# Altium integrated library control_board_v2.IntLib: 31 symbols
Pins are listed as number, name and electrical type; pins without a type are passive.

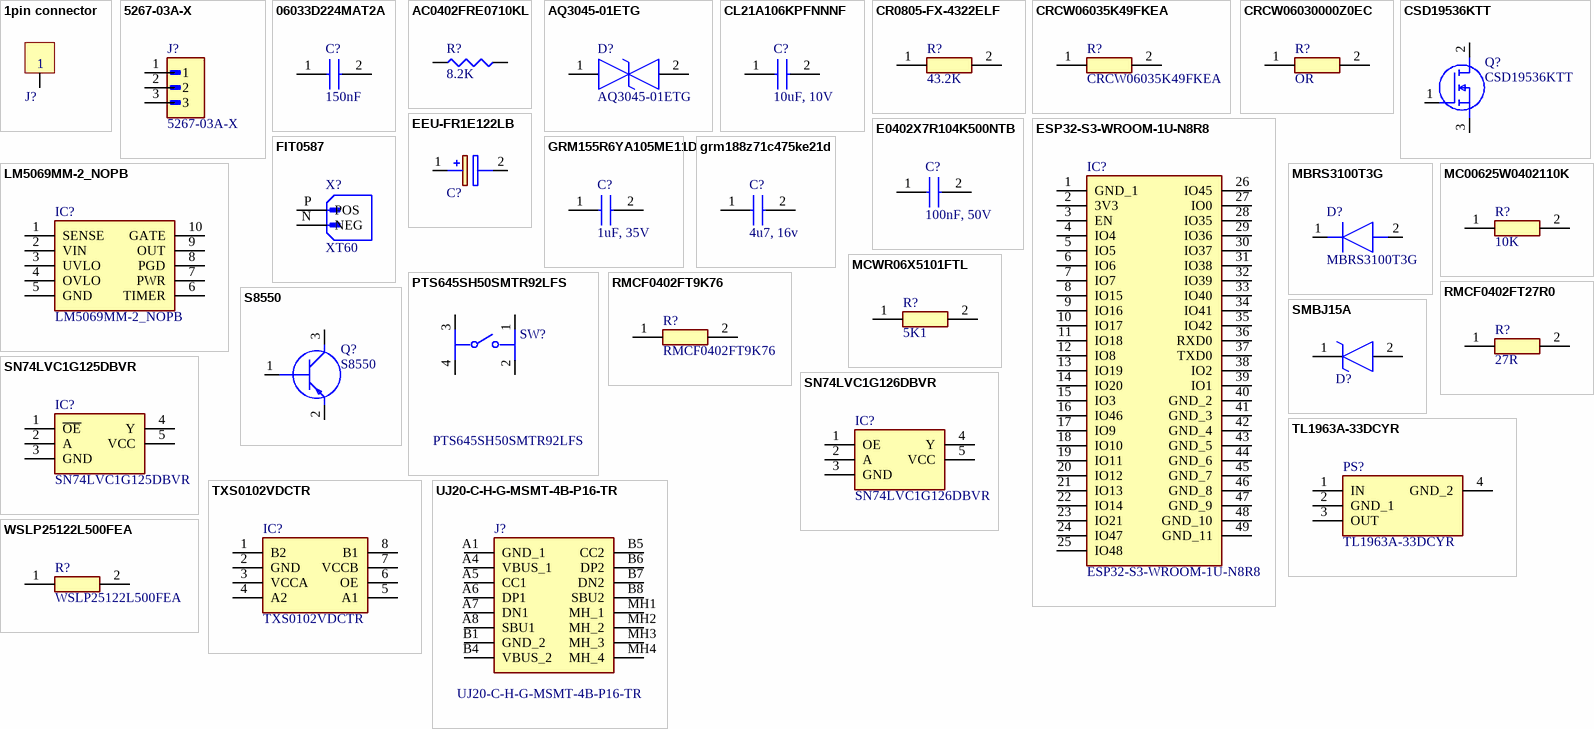
[diagram p0: symbols 1pin connector to WSLP25122L500FEA]

## 1pin connector
designator J?  (value not drawn)
Board Connector, 1 Contact(s), 1 Row(s), Female, Straight, Solder Terminal, Black Insulator, Receptacle; GPIO_Net: *
footprint 1 pin_conn
pins: 1

## 5267-03A-X
designator J?
CONN HEADER TH 3POS 2.5mm; MF: Molex; SnapEDA_Link: https://www.snapeda.com/parts/5267-03A-X/Molex/view-part/?ref=snap; Package: None; Value: *; MP: 5267-03A-X; Check_prices: https://www.snapeda.com/parts/5267-03A-X/Molex/view-part/?ref=eda
footprint MOLEX_5267-03A-X
footprint MOLEX_5267-03A-X
pins: 1, 2, 3

## 06033D224MAT2A
designator C?, comment 150nF
Multilayer Ceramic Capacitors MLCC - SMD/SMT KGM15BR51E224MT NEW GLOBAL PN 25V .22uF A 581-; Manufacturer_Name: Kyocera AVX; Manufacturer_Part_Number: 06033D224MAT2A; Datasheet Link: https://componentsearchengine.com/Datasheets/1/06031A100FAT2A.pdf; Height: 0.9mm; Mouser Part Number: 581-06033D224MAT2A; Mouser Price/Stock: https://www.mouser.co.uk/ProductDetail/KYOCERA-AVX/06033D224MAT2A?qs=VsusWq3clnxkz0k6zqAqqQ%3D%3D
footprint CAPC1608X90N
pins: 1, 2

## AC0402FRE0710KL
designator R?, comment 8.2K
Thin Film Resistors - SMD MCT 0603-50 1% P5 10K2; Manufacturer: Yageo Group; Manufacturer Part Number: AC0402FRE0710KL; Power Dissipation: 62.5mW; Value: 10kΩ; Temperature Coefficient: 50ppm/°C; Working Voltage: 50V; Supplier: DigiKey; Supplier Part Number: 13-AC0402FRE0710KLCT-ND; RoHS: Compliant; Category: Chip SMD Resistors; Stock: 4000; Pricing: 1=0.1, 10=0.037, 25=0.0276, 50=0.0226, 100=0.0186, 250=0.01476, 500=0.01256, 1000=0.01081, 5000=0.00806 (USD); Case/Package: 0402; China RoHS: Non-Compliant; Height: 320µm; Lifecycle Status: Production; Max Operating Temperature: 155°C; Min Operating Temperature: -55°C; Mounting Technology: Surface Mount; Number of Terminals: 2; Packaging: Tape & Reel; REACH SVHC: Yes; Tolerance: 1%; Width: 500µm; ComponentLink1URL: https://datasheet.octopart.com:443/AC0402FRE0710KL-Yageo-datasheet-182189378.pdf?src-supplier=IHS; ComponentLink1Description: https://datasheet.octopart.com:443/AC0402FRE0710KL-Yageo-datasheet-182189378.pdf?src-supplier=IHS; ComponentLink2URL: https://datasheet.octopart.com/AC0402FRE0710KL-Yageo-datasheet-12512238.pdf; ComponentLink2Description: https://datasheet.octopart.com/AC0402FRE0710KL-Yageo-datasheet-12512238.pdf; ComponentLink3URL: http://sigma.octopart.com:80/rohs_statement/Yageo-company-2.pdf?src-supplier=Compliance+Statements; ComponentLink3Description: http://sigma.octopart.com:80/rohs_statement/Yageo-company-2.pdf?src-supplier=Compliance+Statements; ComponentLink4URL: http://sigma.octopart.com:80/conflict_mineral_statement/Yageo-company-3.pdf?src-supplier=Compliance+Statements; ComponentLink4Description: http://sigma.octopart.com:80/conflict_mineral_statement/Yageo-company-3.pdf?src-supplier=Compliance+Statements; LCSC Part Number: C7209924
footprint RESC1005X37N
pins: 1, 2

## AQ3045-01ETG
designator D?
TVS Diode (Bi-directional); Manufacturer_Name: LITTELFUSE; Datasheet Link: http://m.littelfuse.com/~/media/electronics/datasheets/tvs_diode_arrays/littelfuse_tvs_diode_array_aq3045_datasheet.pdf.pdf; Height: 0.42mm; Manufacturer_Part_Number: AQ3045-01ETG; Mouser Part Number: 576-AQ3045-01ETG; Mouser Price/Stock: https://www.mouser.co.uk/ProductDetail/Littelfuse/AQ3045-01ETG?qs=lM4gFlnEeEMEfe%252B5jSw4OA%3D%3D; Arrow Part Number: AQ3045-01ETG; Arrow Price/Stock: https://www.arrow.com/en/products/aq3045-01etg/littelfuse.html?utm_currency=USD&region=nac
footprint AQ304501ETG
pins: 1, 2

## CL21A106KPFNNNF
designator C?, comment 10uF, 10V
Cap Ceramic 10uF 10V X5R 10% SMD 0805 85C Embossed T/R; Manufacturer_Name: Yageo Group; Manufacturer_Part_Number: C0402C101G3GALTU; Height: 0.55mm; Datasheet Link: https://content.kemet.com/datasheets/KEM_C1002_X7R_SMD.pdf
footprint C0402C104J4RACTU
pins: 1, 2

## CR0805-FX-4322ELF
designator R?, comment 43.2K
Res Thick Film 0805 43.2K Ohm 1% 1/8W 100ppm/C Molded SMD SMD Paper Tape on Plastic Reel; Manufacturer_Name: Bourns; Manufacturer_Part_Number: CR0805-FX-4322ELF; Height: 0.6mm; Datasheet Link: https://www.bourns.com/pdfs/chpreztr.pdf; Mouser Part Number: 652-CR0805FX-4322ELF; Mouser Price/Stock: https://www.mouser.co.uk/ProductDetail/Bourns/CR0805-FX-4322ELF?qs=TYKCbaKwe1AoFj9Z1kLM%2Fw%3D%3D
footprint RESC2012X60N
pins: 1, 2

## CRCW06035K49FKEA
designator R?
Res Thick Film 0603 5.49K Ohm 1% 0.1W(1/10W) 100ppm/C Pad SMD T/R Automotive AEC-Q200; Manufacturer_Name: Vishay; Height: 0.5mm; Datasheet Link: http://www.vishay.com/docs/20035/dcrcwe3.pdf; Manufacturer_Part_Number: CRCW06035K49FKEA; Mouser Part Number: 71-CRCW0603-5.49K-E3; Mouser Price/Stock: https://www.mouser.co.uk/ProductDetail/Vishay-Dale/CRCW06035K49FKEA?qs=C0yavoHm3BmrHuoVQmHL9Q%3D%3D
footprint RESC1608X50N
pins: 1, 2

## CRCW06030000Z0EC
designator R?, comment OR
Resistor; Manufacturer_Name: Vishay; Manufacturer_Part_Number: CRCW06030000Z0EC; Height: 0.5mm; Datasheet Link: http://www.vishay.com/docs/20035/dcrcwe3.pdf; Mouser Part Number: 71-CRCW06030000Z0EC; Mouser Price/Stock: https://www.mouser.co.uk/ProductDetail/Vishay-Dale/CRCW06030000Z0EC?qs=5Vo7YKalRVV5nT3RQodYAA%3D%3D; Arrow Part Number: CRCW06030000Z0EC; Arrow Price/Stock: https://www.arrow.com/en/products/crcw06030000z0ec/vishay?utm_currency=USD&region=nac
footprint RESC1608X50N
footprint RESC1608X50N
pins: 1, 2

## CSD19536KTT
designator Q?
MOSFET (N-Channel); Manufacturer_Name: Texas Instruments; Datasheet Link: http://www.ti.com/lit/gpn/csd19536ktt; Manufacturer_Part_Number: CSD19536KTT; Mouser Part Number: 595-CSD19536KTT; Mouser Price/Stock: https://www.mouser.co.uk/ProductDetail/Texas-Instruments/CSD19536KTT?qs=MiqG6Kq1qKP2NIsb3jZrDg%3D%3D; Arrow Part Number: CSD19536KTT; Arrow Price/Stock: https://www.arrow.com/en/products/csd19536ktt/texas-instruments.html?utm_currency=USD&region=nac
footprint CSD19536KTTT
footprint CSD19536KTTT
pins: 1 G, 2 D, 3 S

## E0402X7R104K500NTB
designator C?, comment 100nF, 50V
100 nF 10% 50V Ceramic Capacitor X7R 0402 (1005 Metric); Manufacturer_Name: Yageo Group; Manufacturer_Part_Number: C0402C101G3GALTU; Datasheet Link: https://content.kemet.com/datasheets/KEM_C1002_X7R_SMD.pdf; Height: 0.55mm
footprint C0402C104J4RACTU
footprint C0402C104J4RACTU
pins: 1, 2

## EEU-FR1E122LB
designator C?  (value not drawn)
Capacitor Polarised; Manufacturer_Name: Panasonic; Datasheet Link: http://industrial.panasonic.com/cdbs/www-data/pdf/RDF0000/ABA0000C1259.pdf; Height: 27mm; Manufacturer_Part_Number: EEU-FR1E122LB; Mouser Part Number: 667-EEU-FR1E122LB; Mouser Price/Stock: https://www.mouser.com/Search/Refine.aspx?Keyword=667-EEU-FR1E122LB
footprint CAPPRD500W65D1000H2700
pins: 1 +, 2 -

## ESP32-S3-WROOM-1U-N8R8
designator IC?
Integrated Circuit; Manufacturer_Name: Espressif Systems; Datasheet Link: https://www.espressif.com/sites/default/files/documentation/esp32-s3-wroom-1_wroom-1u_datasheet_en.pdf; Height: 3.35mm; Manufacturer_Part_Number: ESP32-S3-WROOM-1U-N8R8; Mouser Part Number: 356-ESP32S3WRM1UN8R8; Mouser Price/Stock: https://www.mouser.co.uk/ProductDetail/Espressif-Systems/ESP32-S3-WROOM-1U-N8R8?qs=Li%252BoUPsLEnvOglIa3CypaQ%3D%3D
footprint ESP32S3WROOM1UN8R8
footprint ESP32S3WROOM1UN8R8
pins: 1 GND_1, 2 3V3, 3 EN, 4 IO4, 5 IO5, 6 IO6, 7 IO7, 8 IO15, 9 IO16, 10 IO17, 11 IO18, 12 IO8, 13 IO19, 14 IO20, 15 IO3, 16 IO46, 17 IO9, 18 IO10, 19 IO11, 20 IO12, 21 IO13, 22 IO14, 23 IO21, 24 IO47, 25 IO48, 26 IO45, 27 IO0, 28 IO35, 29 IO36, 30 IO37, 31 IO38, 32 IO39, 33 IO40, 34 IO41, 35 IO42, 36 RXD0, 37 TXD0, 38 IO2, 39 IO1, 40 GND_2, 41 GND_3, 42 GND_4, 43 GND_5, 44 GND_6, 45 GND_7, 46 GND_8, 47 GND_9, 48 GND_10, 49 GND_11

## FIT0587
designator X?, comment XT60
High Quality Gold Plated XT60 Male and amp, Female Bullet Connector; Manufacturer: DFRobot; Manufacturer Part Number: FIT0587; Supplier: DigiKey; Supplier Part Number: 1738-1437-ND; Category: Uncategorized; Stock: 5338; Pricing: 1=1.5 (USD); RoHS: Non-Compliant
footprint AMASS_XT60-M
footprint AMASS_XT60-M
pins: N NEG, P POS

## GRM155R6YA105ME11D
designator C?, comment 1uF, 35V
Capacitor; Manufacturer_Name: Murata Electronics; Manufacturer_Part_Number: GRM155R6YA105ME11D; Height: 0.33mm; Datasheet Link: https://search.murata.co.jp/Ceramy/image/img/A01X/G101/ENG/GRM155R6YA105ME11-01A.pdf; Mouser Part Number: 81-GRM155R6YA105ME1D; Mouser Price/Stock: https://www.mouser.com/Search/Refine.aspx?Keyword=81-GRM155R6YA105ME1D; Arrow Part Number: GRM155R6YA105ME11D; Arrow Price/Stock: https://www.arrow.com/en/products/grm155r6ya105me11d/murata-manufacturing
footprint GRM15x
pins: 1, 2

## grm188z71c475ke21d
designator C?, comment 4u7, 16v
Capacitor; Manufacturer_Name: SAMSUNG; Manufacturer_Part_Number: CL10A475KO8NNNC; Height: 0.9mm; Datasheet Link: https://rs.componentsearchengine.com/Datasheets/2/CL10A475KO8NNNC.pdf; Mouser Part Number: 187-CL10A475KO8NNNC; Mouser Price/Stock: https://www.mouser.co.uk/ProductDetail/Samsung-Electro-Mechanics/CL10A475KO8NNNC?qs=X6jEic%2FHinAbIjmLnFfqqQ%3D%3D; Arrow Part Number: CL10A475KO8NNNC; Arrow Price/Stock: https://www.arrow.com/en/products/cl10a475ko8nnnc/samsung-electro-mechanics.html?utm_currency=USD&region=nac
footprint CAPC1608X90N
pins: 1, 2

## LM5069MM-2_NOPB
designator IC?
Integrated Circuit; Manufacturer_Name: Texas Instruments; Manufacturer_Part_Number: LM5069MM-2/NOPB; Datasheet Link: http://www.ti.com/lit/gpn/lm5069; Height: 1.1mm; Mouser Part Number: 926-LM5069MM-2/NOPB; Mouser Price/Stock: https://www.mouser.co.uk/ProductDetail/Texas-Instruments/LM5069MM-2-NOPB?qs=QbsRYf82W3EdgSJlau%252Bfzw%3D%3D; Arrow Part Number: LM5069MM-2/NOPB; Arrow Price/Stock: https://www.arrow.com/en/products/lm5069mm-2nopb/texas-instruments.html?utm_currency=USD&region=nac
footprint SOP50P490X110-10N
footprint LM5069MM-2/NOPB
pins: 1 SENSE, 2 VIN, 3 UVLO, 4 OVLO, 5 GND, 6 TIMER, 7 PWR, 8 PGD, 9 OUT, 10 GATE

## MBRS3100T3G
designator D?
Diode; Manufacturer_Name: onsemi; Datasheet Link: https://www.onsemi.com/pub/Collateral/MBRS3100T3-D.PDF; Height: 2.61mm; Manufacturer_Part_Number: MBRS3100T3G; Mouser Part Number: 863-MBRS3100T3G; Mouser Price/Stock: https://www.mouser.co.uk/ProductDetail/onsemi/MBRS3100T3G?qs=3JMERSakebrbkNtjl3tdRw%3D%3D; Arrow Part Number: MBRS3100T3G; Arrow Price/Stock: https://www.arrow.com/en/products/mbrs3100t3g/on-semiconductor?utm_currency=USD&region=nac
footprint DIOM8059X261N
footprint DIOM8059X261N
pins: 1 K, 2 A

## MC00625W0402110K
designator R?, comment 10K
Res General Purpose Thick Film 0402 10k Ohm 1% 1/16W 100ppm/C Molded; Manufacturer_Name: Multicomp Pro; Manufacturer_Part_Number: MC00625W0402110K; Height: 0.4mm; Datasheet Link: http://www.farnell.com/datasheets/2140393.pdf?_ga=1.247542791.1411154270.1472651675
footprint RESC1005X40N
pins: 1, 2

## MCWR06X5101FTL
designator R?, comment 5K1
Res Thick Film 0603 5.1K Ohm 1% 0.1W(1/10W) 100ppm/C Pad SMD T/R; Manufacturer_Name: Multicomp Pro; Manufacturer_Part_Number: MCWR06X5101FTL; Height: 0.6mm; Datasheet Link: https://4donline.ihs.com/images/VipMasterIC/IC/SCMP/SCMP-S-A0009547702/SCMP-S-A0009547702-1.pdf?hkey=6D3A4C79FDBF58556ACFDE234799DDF0
footprint RESC1608X60N
footprint RESC1608X60N
pins: 1, 2

## PTS645SH50SMTR92LFS
designator SW?
SWITCH TACTILE SPST-NO 0.05A 12V; Manufacturer: C&K Components; Actuator Material: Nylon, Polyamide; Contact Current Rating: 50mA; Contact Resistance: 100mΩ; Electrical Life: 100kcycles; Illumination Type: Illuminated, Non-Illuminated; Insulation Resistance: 100GΩ; Number of Positions: 1; Operating Force: 1.96N; Switch Function: Off-Mom; Throw Configuration: SPST; Supplier: DigiKey; Supplier Part Number: CKN9085CT-ND; Manufacturer Part Number: PTS645SH50SMTR92LFS; RoHS: Compliant; Category: Tactile Switches; Stock: 7683; Pricing: 1=0.35, 10=0.3, 25=0.2804, 100=0.251, 250=0.23256, 500=0.21948, 1000=0.20725, 2000=0.19599, 3000=0.18986, 5000=0.18265, 7000=0.1782, 10000=0.17375, 25000=0.16349, 50000=0.15681 (USD); Case/Package: SMD/SMT; Color: Black; Contact Material: Bronze; Contact Plating: Silver; Current Rating: 50mA; Depth: 9mm; Height: 3.4544mm; Lead Free: Lead Free; Length: 6mm; Life (Cycles): 100kcycles; Lifecycle Status: Production; Max Current Rating: 50mA; Max Operating Temperature: 60°C; Max Voltage Rating (DC): 12V; Mechanical Life: 100kcycles; Min Operating Temperature: -20°C; Mounting Technology: Surface Mount; Orientation: Straight; Packaging: Tape & Reel (TR); REACH SVHC: Yes; Termination: Gull Wing; Voltage Rating (DC): 12V; ComponentLink1URL: https://datasheet.octopart.com:443/PTS645SH50SMTR92LFS-C%26K-Components-datasheet-169841344.pdf?src-supplier=Farnell; ComponentLink1Description: https://datasheet.octopart.com:443/PTS645SH50SMTR92LFS-C%26K-Components-datasheet-169841344.pdf?src-supplier=Farnell; ComponentLink2URL: https://datasheet.octopart.com:443/PTS645SH50SMTR92LFS-C%26K-Components-datasheet-165782998.pdf?src-supplier=Farnell; ComponentLink2Description: https://datasheet.octopart.com:443/PTS645SH50SMTR92LFS-C%26K-Components-datasheet-165782998.pdf?src-supplier=Farnell; ComponentLink3URL: https://datasheet.octopart.com:443/PTS645SH50SMTR92LFS-C%26K-Components-datasheet-67873720.pdf?src-supplier=Upverter; ComponentLink3Description: https://datasheet.octopart.com:443/PTS645SH50SMTR92LFS-C%26K-Components-datasheet-67873720.pdf?src-supplier=Upverter; ComponentLink4URL: https://datasheet.octopart.com:443/PTS645SH50SMTR92-LFS-C%26K-Components-datasheet-141421486.pdf?src-supplier=Upverter; ComponentLink4Description: https://datasheet.octopart.com:443/PTS645SH50SMTR92-LFS-C%26K-Components-datasheet-141421486.pdf?src-supplier=Upverter; ComponentLink5URL: https://datasheet.octopart.com:443/PTS645SH50SMTR92-LFS-C%26K-Components-datasheet-110647872.pdf?src-supplier=TME; ComponentLink5Description: https://datasheet.octopart.com:443/PTS645SH50SMTR92-LFS-C%26K-Components-datasheet-110647872.pdf?src-supplier=TME; ComponentLink6URL: https://datasheet.octopart.com:443/PTS645SH50SMTR-92-LFS-C%26K-Components-datasheet-150821959.pdf?src-supplier=TME; ComponentLink6Description: https://datasheet.octopart.com:443/PTS645SH50SMTR-92-LFS-C%26K-Components-datasheet-150821959.pdf?src-supplier=TME; ComponentLink7URL: https://datasheet.octopart.com:443/PTS645SH50SMTR92LFS-C%26K-Components-datasheet-138128951.pdf?src-supplier=Future+Electronics; ComponentLink7Description: https://datasheet.octopart.com:443/PTS645SH50SMTR92LFS-C%26K-Components-datasheet-138128951.pdf?src-supplier=Future+Electronics; ComponentLink8URL: https://datasheet.octopart.com:443/PTS645SH50SMTR92LFS-C%26K-Components-datasheet-62111174.pdf?src-supplier=Future+Electronics; ComponentLink8Description: https://datasheet.octopart.com:443/PTS645SH50SMTR92LFS-C%26K-Components-datasheet-62111174.pdf?src-supplier=Future+Electronics; ComponentLink9URL: https://datasheet.octopart.com:443/PTS645SH50SMTR92LFS-C%26K-Components-datasheet-24578962.pdf?src-supplier=Future+Electronics; ComponentLink9Description: https://datasheet.octopart.com:443/PTS645SH50SMTR92LFS-C%26K-Components-datasheet-24578962.pdf?src-supplier=Future+Electronics; ComponentLink10URL: https://datasheet.octopart.com:443/PTS645SH50SMTR92-LFS-C%26K-Components-datasheet-12590747.pdf?src-supplier=Future+Electronics; ComponentLink10Description: https://datasheet.octopart.com:443/PTS645SH50SMTR92-LFS-C%26K-Components-datasheet-12590747.pdf?src-supplier=Future+Electronics; LCSC Part Number: C221869
footprint FP-PTS645SH50SMTR92LFS-MFG
footprint FP-PTS645SH50SMTR92LFS-MFG - duplicate
pins: 1, 2, 3, 4

## RMCF0402FT9K76
designator R?
Res Thick Film 0402 9.76K Ohm 1% 0.063W 100ppm/C Molded SMD Paper T/R; Manufacturer_Name: Stackpole Electronics; Height: 0.4mm; Datasheet Link: https://cs.seielect.com/catalog/SEI-RMCF_RMCP.pdf; Manufacturer_Part_Number: RMCF0402FT9K76
footprint RESC1005X40N
pins: 1, 2

## RMCF0402FT27R0
designator R?, comment 27R
RMCF0402FT27R0; Manufacturer_Name: Yageo Group; Manufacturer_Part_Number: RC0402FR-0727RL; Height: 0.4mm; Datasheet Link: https://www.yageogroup.com/content/datasheet/asset/file/PYU-RC_GROUP_51_ROHS_L; Mouser Part Number: 603-RC0402FR-0727RL; Mouser Price/Stock: https://www.mouser.co.uk/ProductDetail/YAGEO/RC0402FR-0727RL?qs=UOUeRUa%252B8Wlb37UyFHw9Bw%3D%3D; Arrow Part Number: RC0402FR-0727RL; Arrow Price/Stock: https://www.arrow.com/en/products/rc0402fr-0727rl/yageo.html?utm_currency=USD&region=nac
footprint RESC1005X40N
footprint RESC1005X40N
pins: 1, 2

## S8550
designator Q?
Transistor BJT PNP; Manufacturer_Name: Galaxy; Datasheet Link: https://datasheet.datasheetarchive.com/originals/distributors/Datasheets-3/DSA-49109.pdf; Height: 1.1mm; Manufacturer_Part_Number: S8550
footprint SOT95P240X110-3N
footprint SOT95P240X110-3N
pins: 1 B, 2 E, 3 C

## SMBJ15A
designator D?  (value not drawn)
TVS Diode (Uni-directional); Manufacturer_Name: Vishay; Datasheet Link: http://www.vishay.com/docs/88392/smbj.pdf; Height: 2.44mm; Manufacturer_Part_Number: SMBJ15A; Mouser Part Number: 78-SMBJ15A; Mouser Price/Stock: https://www.mouser.co.uk/ProductDetail/Vishay-General-Semiconductor/SMBJ15A?qs=%252BA9HMDDz5KavBY56EO7ceQ%3D%3D
footprint DIOM5436X244N
pins: 1 K, 2 A

## SN74LVC1G125DBVR
designator IC?
Integrated Circuit; Manufacturer_Name: Texas Instruments; Datasheet Link: http://www.ti.com/lit/ds/symlink/sn74lvc1g125.pdf; Height: 1.45mm; Manufacturer_Part_Number: SN74LVC1G125DBVR; Mouser Part Number: 595-SN74LVC1G125DBVR; Mouser Price/Stock: https://www.mouser.co.uk/ProductDetail/Texas-Instruments/SN74LVC1G125DBVR?qs=dT9u2OTAaVWCjkJK89JQQg%3D%3D; Arrow Part Number: SN74LVC1G125DBVR; Arrow Price/Stock: https://www.arrow.com/en/products/sn74lvc1g125dbvr/texas-instruments.html?utm_currency=USD&region=asia
footprint SOT95P280X145-5N
footprint SOT95P280X145-5N
pins: 1 ~{OE}, 2 A, 3 GND, 4 Y, 5 VCC

## SN74LVC1G126DBVR
designator IC?
Integrated Circuit; Manufacturer_Name: Texas Instruments; Datasheet Link: http://www.ti.com/lit/ds/symlink/sn74lvc1g126.pdf; Height: 1.45mm; Manufacturer_Part_Number: SN74LVC1G126DBVR; Mouser Part Number: 595-SN74LVC1G126DBVR; Mouser Price/Stock: https://www.mouser.co.uk/ProductDetail/Texas-Instruments/SN74LVC1G126DBVR?qs=pajgIaoyDUi3T2WgNNfd3w%3D%3D; Arrow Part Number: SN74LVC1G126DBVR; Arrow Price/Stock: https://www.arrow.com/en/products/sn74lvc1g126dbvr/texas-instruments.html?utm_currency=USD&region=nac
footprint SOT95P280X145-5N
footprint SOT95P280X145-5N
pins: 1 OE, 2 A, 3 GND, 4 Y, 5 VCC

## TL1963A-33DCYR
designator PS?
Power Supply; Manufacturer_Name: Texas Instruments; Datasheet Link: http://www.ti.com/lit/gpn/tl1963a; Height: 1.8mm; Manufacturer_Part_Number: TL1963A-33DCYR; Mouser Part Number: 595-TL1963A-33DCYR; Mouser Price/Stock: https://www.mouser.co.uk/ProductDetail/Texas-Instruments/TL1963A-33DCYR?qs=IK5e5L0zOXhRu%2FNTAfJNEA%3D%3D; Arrow Part Number: TL1963A-33DCYR; Arrow Price/Stock: https://www.arrow.com/en/products/tl1963a-33dcyr/texas-instruments?utm_currency=USD&region=nac
footprint SOT230P700X180-4N
footprint TL1963A-33DCYR
pins: 1 IN, 2 GND_1, 3 OUT, 4 GND_2

## TXS0102VDCTR
designator IC?
Integrated Circuit; Manufacturer_Name: Texas Instruments; Datasheet Link: https://www.ti.com/lit/ds/symlink/txs0102v.pdf?ts=1736527127556&ref_url=https%253A%252F%252Fwww.ti.com%252Flogic-voltage-translation%252Fvoltage-translators-level-shifters%252Fproducts.html; Height: 1.3mm; Manufacturer_Part_Number: TXS0102VDCTR; Mouser Part Number: 595-TXS0102VDCTR; Mouser Price/Stock: https://www.mouser.co.uk/ProductDetail/Texas-Instruments/TXS0102VDCTR?qs=olJun0bQHM%2FUS3bAIjbB0A%3D%3D; Arrow Part Number: TXS0102VDCTR; Arrow Price/Stock: https://www.arrow.com/en/products/txs0102vdctr/texas-instruments?utm_currency=USD&region=nac
footprint SOP65P400X130-8N
footprint SOP65P400X130-8N
pins: 1 B2, 2 GND, 3 VCCA, 4 A2, 5 A1, 6 OE, 7 VCCB, 8 B1

## UJ20-C-H-G-MSMT-4B-P16-TR
designator J?
Connector; Manufacturer_Name: Same Sky; Datasheet Link: https://www.sameskydevices.com/product/resource/uj20-c-h-g-msmt-4b-p16-tr.pdf; Height: 2.6mm; Manufacturer_Part_Number: UJ20-C-H-G-MSMT-4B-P16-TR
footprint UJ20CHGMSMT4BP16TR
pins: A1 GND_1, A4 VBUS_1, A5 CC1, A6 DP1, A7 DN1, A8 SBU1, B1 GND_2, B4 VBUS_2, B5 CC2, B6 DP2, B7 DN2, B8 SBU2, MH1 MH_1, MH2 MH_2, MH3 MH_3, MH4 MH_4

## WSLP25122L500FEA
designator R?
Fixed Resistor, Metal Strip, 3W, 0.0025ohm, 0.0866V, 1% +/-Tol, 275ppm/Cel, Surface Mount, 2512; Manufacturer_Name: Vishay; Height: 0.889mm; Datasheet Link: https://componentsearchengine.com/Datasheets/1/WSLP25122L500FEA.pdf; Manufacturer_Part_Number: WSLP25122L500FEA; Mouser Part Number: 71-WSLP25122L500FEA; Mouser Price/Stock: https://www.mouser.co.uk/ProductDetail/Vishay-Dale/WSLP25122L500FEA?qs=%2FCXICPRLKg%252BpcyljWM%2FHhA%3D%3D; Arrow Part Number: WSLP25122L500FEA; Arrow Price/Stock: https://www.arrow.com/en/products/wslp25122l500fea/vishay?utm_currency=USD&region=nac
footprint RESC6432X89N
pins: 1, 2